# Altium footprint library KLDHCX0202B.PcbLib: 1 footprints
Each footprint in its own frame and in the unit in brackets; x right, y up, seen from the top. Pads: shape width x height; smd on the part's side, far side on the other; paste and mask are expansions set on the pad; w line width, h text height; cw(c..) or ccw(c..) is an arc to the next point about the centre after c.
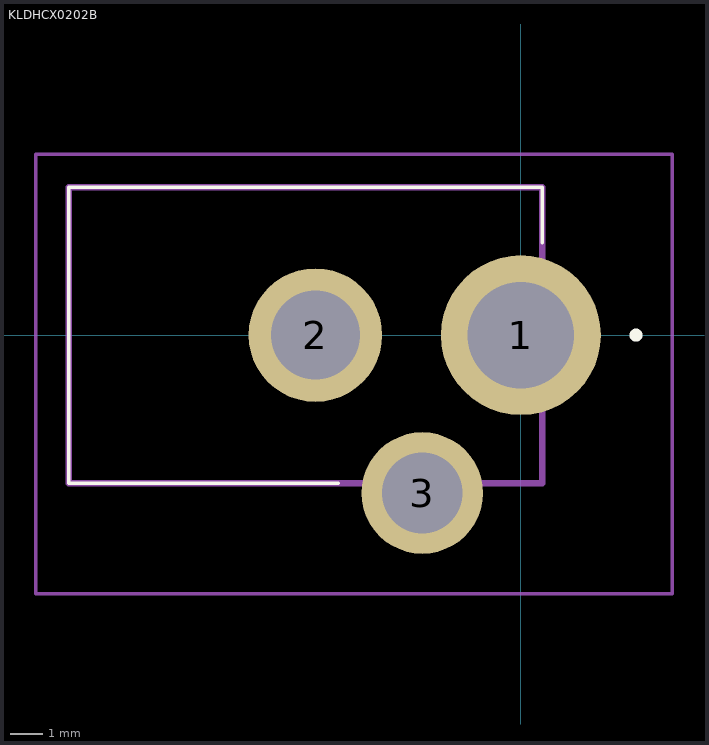
[diagram p0: the footprint, top view; thin cyan lines are the x and y axes]

## KLDHCX0202B [mm]
pads (3):
  round 4.86 hole 3.24: 1(0,0)
  round 4.065 hole 2.71: 2(-6.25,0)
  round 3.7 hole 2.46: 3(-3,-4.8)
Top Overlay:
  lines w0.1: -5.55,-4.5 -13.75,-4.5 -13.75,4.5 0.65,4.5 0.65,2.8
  lines w0.2: 3.4,0 cw(c3.5,0) 3.6,0 ; 3.4,0 3.4,0 ; 3.4,0 ccw(c3.5,0) 3.6,0 ; 3.6,0 3.6,0
Mechanical 15:
  lines w0.2: -13.75,-4.5 0.65,-4.5 0.65,4.5 -13.75,4.5 -13.75,-4.5
Mechanical 20:
  lines w0.1: -14.75,-7.862 4.6,-7.862 4.6,5.5 -14.75,5.5 -14.75,-7.862